# Altium footprint library Footprint_Vlad.PcbLib: 392 footprints (part 24 of 25)
Each footprint in its own frame and in the unit in brackets; x right, y up, seen from the top. Pads: shape width x height; smd on the part's side, far side on the other; paste and mask are expansions set on the pad; w line width, h text height; cw(c..) or ccw(c..) is an arc to the next point about the centre after c.
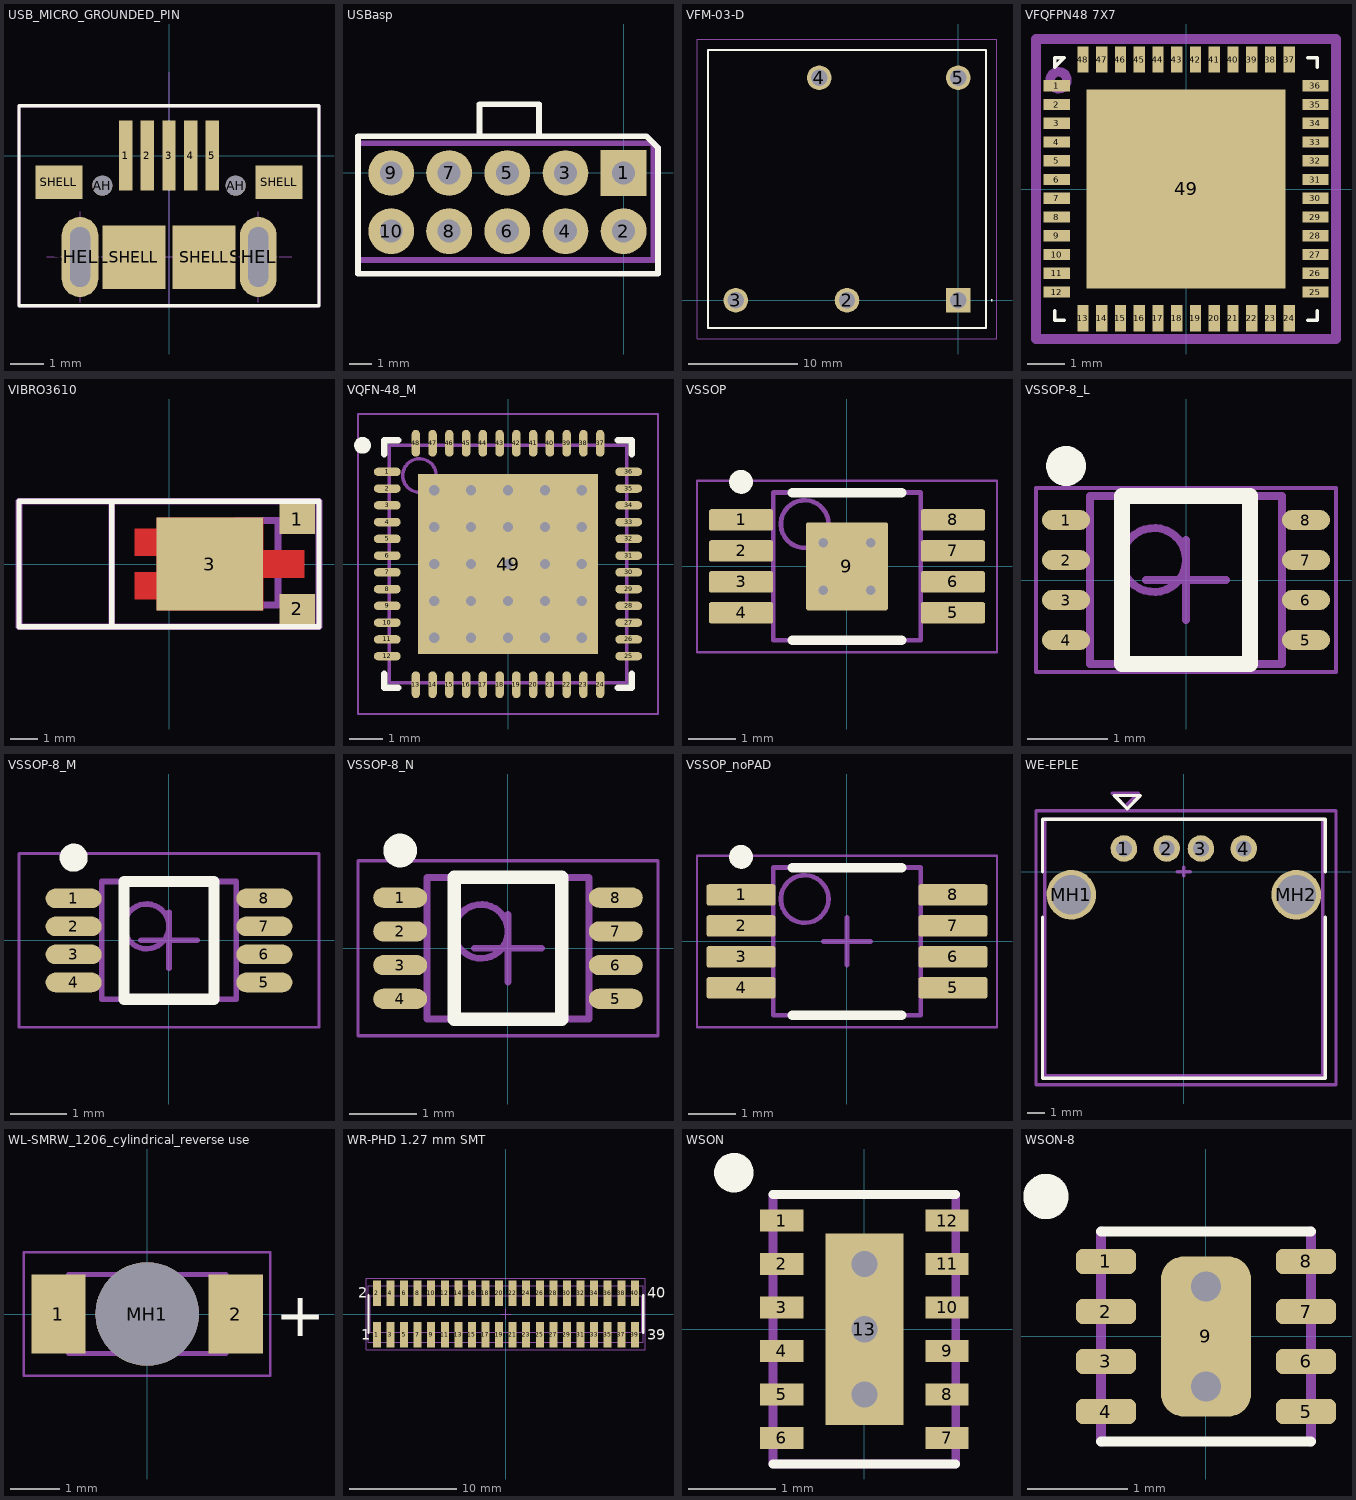
[diagram p23: the footprints below, top view; thin cyan lines are the x and y axes]

## USB_MICRO_GROUNDED_PIN [mm]
pads (13):
  rect 0.4x2.1 smd: 1(-1.3,0) 2(-0.65,0) 3(0,0) 4(0.65,0) 5(1.3,0)
  round 0.6 hole 0.6 unplated: AH(-2,-0.9) AH(2,-0.9)
  rect 1.4x1 smd: SHELL(-3.3,-0.8) SHELL(3.3,-0.8)
  oval 1.1x2.4 hole 0.6 slot 1.8 at 90 deg: SHELL(-2.67,-3.04) SHELL(2.68,-3.04)
  rect 1.9x1.9 smd: SHELL(-1.05,-3.05) SHELL(1.05,-3.05)
Top Overlay:
  lines w0.1: -4.5,-4.5 4.5,-4.5 4.5,1.5 -4.5,1.5 -4.5,-4.5
Mechanical 3:
  lines w0.01: -3.67,-3.04 3.68,-3.04 ; -2.67,-4.4 -2.67,-1.69 ; 0,-4.5 0,2.5 ; 2.68,-4.4 2.68,-1.69
Mechanical 15:
  lines w0.1: -4.5,-4.5 -4.5,1.5 4.5,1.5 4.5,-4.5 -4.5,-4.5
  text ".Designator" at -2.25,-1.25 h1.52
3D body "User Library-3057-51550001R-Rev_01.step": height 2.77, standoff -0.17, extent -4.75,-5.48 4.75,0.46

## USBasp [mm]
pads (10):
  rect 2x2 hole 1: 1(0,0)
  round 2 hole 1: 2(0,-2.54) 3(-2.54,0) 4(-2.54,-2.54) 5(-5.08,0) 6(-5.08,-2.54) 7(-7.62,0) 8(-7.62,-2.54) 9(-10.15,0) 10(-10.15,-2.54)
Top Overlay:
  lines w0.254: -6.3,1.6 -6.3,3 -3.7,3 -3.7,1.6 ; -11.6,-4.4 -11.6,1.6 1,1.6 1.5,1.1 1.5,-4.4 -11.6,-4.4
Mechanical 15:
  circle w0.254: c0,0 r0.1
  lines w0.254: -11.6,-3.8 1.3,-3.8 1.3,1.3 -11.6,1.3 -11.6,-3.8
  text ".Designator" at -11.2,1.6 h1.52
3D body "User Library-BH-10___64.step": height 8.84, standoff -3.3, extent -15.26,-6.025 5.1,3.175

## VFM-03-D [mm]
pads (5):
  rect 2.25x2.25 hole 1.5: 1(0,0)
  round 2.25 hole 1.5: 2(-10.16,0) 3(-20.32,0) 4(-12.7,20.32) 5(0,20.32)
Top Overlay:
  lines w0.1: 3,0 cw(c3.05,0) 3.1,0 cw(c3.05,0) 3,0
  lines w0.2: -22.86,-2.54 -22.86,22.86 2.54,22.86 2.54,-2.54 -22.86,-2.54
Mechanical 15:
  lines w0.1: -22.86,-2.54 -22.86,22.86 2.54,22.86 2.54,-2.54 -22.86,-2.54
Mechanical 20:
  lines w0.1: -23.86,-3.54 -23.86,23.86 3.54,23.86 3.54,-3.54 -23.86,-3.54
3D body "VFM-03-D.stp": height 12.3, standoff -5, extent -22.86,-2.54 2.54,22.86

## VFQFPN48 7X7 [mm]
pads (49):
  rect 0.7x0.3 smd: 1(-3.45,2.75) 2(-3.45,2.25) 3(-3.45,1.75) 4(-3.45,1.25) 5(-3.45,0.75) 6(-3.45,0.25) 7(-3.45,-0.25) 8(-3.45,-0.75) 9(-3.45,-1.25) 10(-3.45,-1.75) 11(-3.45,-2.25) 12(-3.45,-2.75) 25(3.45,-2.75) 26(3.45,-2.25) 27(3.45,-1.75) 28(3.45,-1.25) 29(3.45,-0.75) 30(3.45,-0.25) 31(3.45,0.25) 32(3.45,0.75) 33(3.45,1.25) 34(3.45,1.75) 35(3.45,2.25) 36(3.45,2.75)
  rect 0.3x0.7 smd: 13(-2.75,-3.45) 14(-2.25,-3.45) 15(-1.75,-3.45) 16(-1.25,-3.45) 17(-0.75,-3.45) 18(-0.25,-3.45) 19(0.25,-3.45) 20(0.75,-3.45) 21(1.25,-3.45) 22(1.75,-3.45) 23(2.25,-3.45) 24(2.75,-3.45) 37(2.75,3.45) 38(2.25,3.45) 39(1.75,3.45) 40(1.25,3.45) 41(0.75,3.45) 42(0.25,3.45) 43(-0.25,3.45) 44(-0.75,3.45) 45(-1.25,3.45) 46(-1.75,3.45) 47(-2.25,3.45) 48(-2.75,3.45)
  rect 5.3x5.3 smd: 49(0,0)
Top Overlay:
  lines w0.1: -3.5,-3.25 -3.5,-3.5 -3.25,-3.5 ; 3.25,-3.5 3.5,-3.5 3.5,-3.25 ; 3.25,3.5 3.5,3.5 3.5,3.25 ; -3.5,3.25 -3.5,3.5 -3.25,3.5 -3.5,3.25
Mechanical 15:
  circle w0.254: c-3.4,2.9 r0.224
  lines w0.254: -4,-4 4,-4 4,4 -4,4 -4,-4
  text ".Designator" at -3,4.2 h1.52

## VIBRO3610 [mm]
pads (3):
  rect 1.3x1.1 smd: 1(4.7,1.65) 2(4.7,-1.65)
  rect 3.9x3.4 smd paste-25.4 mask-25.4: 3(1.5,0)
Top Layer:
  region: -0.45,-1.7 3.45,-1.7 3.45,-0.5 4.95,-0.5 4.95,0.5 3.45,0.5 3.45,1.7 -0.45,1.7 -0.45,1.3 -1.25,1.3 -1.25,0.3 -0.45,0.3 -0.45,-0.3 -1.25,-0.3 -1.25,-1.3 -0.45,-1.3
Top Overlay:
  lines w0.2: -2.1,-2.3 -2.1,2.3 ; -5.5,-2.3 5.5,-2.3 5.5,2.3 -5.5,2.3 -5.5,-2.3
Top Paste:
  region: -0.45,-1.7 3.45,-1.7 3.45,-0.5 4.95,-0.5 4.95,0.5 3.45,0.5 3.45,1.7 -0.45,1.7 -0.45,1.3 -1.25,1.3 -1.25,0.3 -0.45,0.3 -0.45,-0.3 -1.25,-0.3 -1.25,-1.3 -0.45,-1.3
Top Solder:
  region: -0.45,-1.7 3.45,-1.7 3.45,-0.5 4.95,-0.5 4.95,0.5 3.45,0.5 3.45,1.7 -0.45,1.7 -0.45,1.3 -1.25,1.3 -1.25,0.3 -0.45,0.3 -0.45,-0.3 -1.25,-0.3 -1.25,-1.3 -0.45,-1.3
Mechanical 15:
  lines w0.254: -2.1,-2.2 -2.1,2.3 ; -0.254,0 0.254,0 ; 0,-0.254 0,0.254 ; 2.5,1.6 4,1.6 4,-1.5 2.7,-1.5 ; -5.5,-2.3 -5.5,2.3 5.5,2.3 5.5,-2.3 -5.5,-2.3
  text ".Designator" at -2,2.6 h1.52
3D body "User Library-z30c1t8219651.step": height 3.59, standoff 0, extent -5.05,-2.096 5.75,2.196

## VQFN-48_M [mm] "QFN, 48-Leads, Body 7.08x7.08mm, Pitch 0.5mm, Thermal Pad 5.36x5.36mm, IPC Low Density"
height 1
pads (49):
  oval 0.8x0.25 smd: 1(-3.6,2.75) 2(-3.6,2.25) 3(-3.6,1.75) 4(-3.6,1.25) 5(-3.6,0.75) 6(-3.6,0.25) 7(-3.6,-0.25) 8(-3.6,-0.75) 9(-3.6,-1.25) 10(-3.6,-1.75) 11(-3.6,-2.25) 12(-3.6,-2.75) 25(3.6,-2.75) 26(3.6,-2.25) 27(3.6,-1.75) 28(3.6,-1.25) 29(3.6,-0.75) 30(3.6,-0.25) 31(3.6,0.25) 32(3.6,0.75) 33(3.6,1.25) 34(3.6,1.75) 35(3.6,2.25) 36(3.6,2.75)
  oval 0.25x0.8 smd: 13(-2.75,-3.6) 14(-2.25,-3.6) 15(-1.75,-3.6) 16(-1.25,-3.6) 17(-0.75,-3.6) 18(-0.25,-3.6) 19(0.25,-3.6) 20(0.75,-3.6) 21(1.25,-3.6) 22(1.75,-3.6) 23(2.25,-3.6) 24(2.75,-3.6) 37(2.75,3.6) 38(2.25,3.6) 39(1.75,3.6) 40(1.25,3.6) 41(0.75,3.6) 42(0.25,3.6) 43(-0.25,3.6) 44(-0.75,3.6) 45(-1.25,3.6) 46(-1.75,3.6) 47(-2.25,3.6) 48(-2.75,3.6)
  rect 5.36x5.36 smd: 49(0,0)
via 2.2,-2.2 diameter 0.6 hole 0.3
via 1.1,-2.2 diameter 0.6 hole 0.3
via 0,-2.2 diameter 0.6 hole 0.3
via -1.1,-2.2 diameter 0.6 hole 0.3
via -2.2,-2.2 diameter 0.6 hole 0.3
via 2.2,-1.1 diameter 0.6 hole 0.3
via 1.1,-1.1 diameter 0.6 hole 0.3
via 0,-1.1 diameter 0.6 hole 0.3
via -1.1,-1.1 diameter 0.6 hole 0.3
via -2.2,-1.1 diameter 0.6 hole 0.3
via 2.2,0 diameter 0.6 hole 0.3
via 1.1,0 diameter 0.6 hole 0.3
via 0,0 diameter 0.6 hole 0.3
via -1.1,0 diameter 0.6 hole 0.3
via -2.2,0 diameter 0.6 hole 0.3
via 2.2,1.1 diameter 0.6 hole 0.3
via 1.1,1.1 diameter 0.6 hole 0.3
via 0,1.1 diameter 0.6 hole 0.3
via -1.1,1.1 diameter 0.6 hole 0.3
via -2.2,1.1 diameter 0.6 hole 0.3
via 2.2,2.2 diameter 0.6 hole 0.3
via 1.1,2.2 diameter 0.6 hole 0.3
via 0,2.2 diameter 0.6 hole 0.3
via -1.1,2.2 diameter 0.6 hole 0.3
via -2.2,2.2 diameter 0.6 hole 0.3
Top Overlay:
  circle w0.25: c-4.34,3.54 r0.125
  lines w0.2: -3.69,-3.275 -3.69,-3.69 -3.275,-3.69 ; -3.69,3.275 -3.69,3.69 -3.275,3.69 ; 3.275,-3.69 3.69,-3.69 3.69,-3.275 ; 3.275,3.69 3.69,3.69 3.69,3.275
Mechanical 13:
  circle w0.1: c-2.64,2.64 r0.5
  lines w0.1: -3.54,-3.54 3.54,-3.54 3.54,3.54 -3.54,3.54 -3.54,-3.54
Mechanical 15:
  lines w0.05: -4.475,-4.475 4.475,-4.475 4.475,4.475 -4.475,4.475 -4.475,-4.475
  lines w0.1: -0.5,0 0.5,0 ; 0,-0.5 0,0.5
3D body: height 1, standoff 0, extent -3.54,-3.54 3.54,3.54

## VSSOP [mm] "TSOP, 8-Leads, Body 3.1x3.1mm, Pitch 0.65mm, Thermal Pad 1.85x1.73mm, IPC Medium Density"
height 1.1
pads (9):
  rrect22% 1.35x0.45 smd: 1(-2.225,0.975) 2(-2.225,0.325) 3(-2.225,-0.325) 4(-2.225,-0.975) 5(2.225,-0.975) 6(2.225,-0.325) 7(2.225,0.325) 8(2.225,0.975)
  rrect6% 1.73x1.85 smd: 9(0,0)
via 0.5,-0.5 diameter 0.4 hole 0.2
via -0.5,-0.5 diameter 0.4 hole 0.2
via 0.5,0.5 diameter 0.4 hole 0.2
via -0.5,0.5 diameter 0.4 hole 0.2
Top Overlay:
  circle w0.25: c-2.225,1.775 r0.125
  lines w0.2: -1.15,-1.55 1.15,-1.55 ; -1.15,1.55 1.15,1.55
Mechanical 1:
  text ".Designator" at -1.397,-0.254 h0.7
Mechanical 13:
  circle w0.1: c-0.889,0.889 r0.5
  lines w0.1: -1.55,-1.55 1.55,-1.55 1.55,1.55 -1.55,1.55 -1.55,-1.55
Mechanical 15:
  lines w0.05: -3.15,-1.8 3.15,-1.8 3.15,1.8 -3.15,1.8 -3.15,-1.8
  lines w0.1: -0.5,0 0.5,0 ; 0,-0.5 0,0.5
3D body "MUY08A_ASM.stp": height 0.94, standoff -0.02, extent -2.451,-1.499 2.451,1.499

## VSSOP-8_L [mm] "VSSOP, 8-Leads, Body 2,00x2,30mm, Pitch 0,50mm, IPC High Density"
height 0.9
pads (8):
  oval 0.6x0.25 smd: 1(-1.5,0.75) 2(-1.5,0.25) 3(-1.5,-0.25) 4(-1.5,-0.75) 5(1.5,-0.75) 6(1.5,-0.25) 7(1.5,0.25) 8(1.5,0.75)
Top Overlay:
  circle w0.25: c-1.5,1.425 r0.125
  lines w0.2: -0.8,-1.05 0.8,-1.05 0.8,1.05 -0.8,1.05 -0.8,-1.05
Assembly Top:
  circle w0.1: c-0.4,0.25 r0.4
  lines w0.1: -1.2,-1.05 1.2,-1.05 1.2,1.05 -1.2,1.05 -1.2,-1.05
Courtyard Top:
  lines w0.05: -1.875,-1.15 1.875,-1.15 1.875,1.15 -1.875,1.15 -1.875,-1.15
  lines w0.1: -0.5,0 0.5,0 ; 0,-0.5 0,0.5
3D body "VSSOP-8_L.step": height 0.9, standoff 0, extent -1.549,-1.05 1.549,1.05

## VSSOP-8_M [mm] "VSSOP, 8-Leads, Body 2,00x2,30mm, Pitch 0,50mm, IPC Low Density"
height 0.9
pads (8):
  oval 1x0.35 smd: 1(-1.7,0.75) 2(-1.7,0.25) 3(-1.7,-0.25) 4(-1.7,-0.75) 5(1.7,-0.75) 6(1.7,-0.25) 7(1.7,0.25) 8(1.7,0.75)
Top Overlay:
  circle w0.25: c-1.7,1.475 r0.125
  lines w0.2: -0.8,-1.05 -0.8,1.05 0.8,1.05 0.8,-1.05 -0.8,-1.05
Assembly Top:
  circle w0.1: c-0.4,0.25 r0.4
  lines w0.1: -1.2,-1.05 -1.2,1.05 1.2,1.05 1.2,-1.05 -1.2,-1.05
Courtyard Top:
  lines w0.05: -2.675,-1.55 -2.675,1.55 2.675,1.55 2.675,-1.55 -2.675,-1.55
  lines w0.1: -0.5,0 0.5,0 ; 0,-0.5 0,0.5
3D body "VSSOP-8_M.step": height 0.9, standoff 0, extent -1.549,-1.05 1.549,1.05

## VSSOP-8_N [mm] "VSSOP, 8-Leads, Body 2,00x2,30mm, Pitch 0,50mm, IPC Medium Density"
height 0.9
pads (8):
  oval 0.8x0.3 smd: 1(-1.6,0.75) 2(-1.6,0.25) 3(-1.6,-0.25) 4(-1.6,-0.75) 5(1.6,-0.75) 6(1.6,-0.25) 7(1.6,0.25) 8(1.6,0.75)
Top Overlay:
  circle w0.25: c-1.6,1.45 r0.125
  lines w0.2: -0.8,-1.05 -0.8,1.05 0.8,1.05 0.8,-1.05 -0.8,-1.05
Assembly Top:
  circle w0.1: c-0.4,0.25 r0.4
  lines w0.1: -1.2,-1.05 -1.2,1.05 1.2,1.05 1.2,-1.05 -1.2,-1.05
Courtyard Top:
  lines w0.05: -2.225,-1.3 -2.225,1.3 2.225,1.3 2.225,-1.3 -2.225,-1.3
  lines w0.1: -0.5,0 0.5,0 ; 0,-0.5 0,0.5
3D body "VSSOP-8_N.step": height 0.9, standoff 0, extent -1.549,-1.05 1.549,1.05

## VSSOP_noPAD [mm] "TSOP, 8-Leads, Body 3.1x3.1mm, Pitch 0.65mm, Thermal Pad 1.85x1.73mm, IPC Medium Density"
height 1.1
pads (8):
  rrect22% 1.45x0.45 smd: 1(-2.225,0.975) 2(-2.225,0.325) 3(-2.225,-0.325) 4(-2.225,-0.975) 5(2.225,-0.975) 6(2.225,-0.325) 7(2.225,0.325) 8(2.225,0.975)
Top Overlay:
  circle w0.25: c-2.225,1.775 r0.125
  lines w0.2: -1.15,-1.55 1.15,-1.55 ; -1.15,1.55 1.15,1.55
Mechanical 1:
  text ".Designator" at -1.397,-0.254 h0.7
Mechanical 13:
  circle w0.1: c-0.889,0.889 r0.5
  lines w0.1: -1.55,-1.55 -1.55,1.55 1.55,1.55 1.55,-1.55 -1.55,-1.55
Mechanical 15:
  lines w0.05: -3.15,-1.8 -3.15,1.8 3.15,1.8 3.15,-1.8 -3.15,-1.8
  lines w0.1: -0.5,0 0.5,0 ; 0,-0.5 0,0.5
3D body "MUY08A_ASM.stp": height 0.94, standoff -0.02, extent -2.451,-1.499 2.451,1.499

## WE-EPLE [mm] "THT, USB 2.0 A Connector, 4Pin, Body 15.8 x14.5mm"
height 7.12
pads (6):
  round 1.55 hole 0.92: 1(-3.5,1.35) 2(-1,1.35) 3(1,1.35) 4(3.5,1.35)
  round 2.9 hole 2.3: MH1(-6.57,-1.35) MH2(6.57,-1.35)
Top Overlay:
  lines w0.2: -8.255,-2.667 -8.255,-12.065 8.255,-12.065 8.255,-2.667 ; -8.255,0 -8.255,3.048 8.255,3.048 8.255,0 ; -4.064,4.445 -3.302,3.683 -2.54,4.445 -4.064,4.445
Mechanical 13:
  lines w0.2: -8.128,-11.938 -8.128,3.048 8.128,3.048 8.128,-11.938 -8.128,-11.938
Mechanical 15:
  lines w0.2: -0.381,0 0.381,0 ; 0,-0.254 0,0.254 ; -8.636,-12.446 -8.636,3.556 8.89,3.556 8.89,-12.446 -8.636,-12.446 ; -4.191,4.572 -2.667,4.572 -3.429,3.81 -4.191,4.572
  text ".Designator" at 0,0 h0.76
3D body "WE-EPLE_8492121_1.stp": height 7.8, standoff -3.49, extent -7.892,-11.698 7.873,2.802

## WL-SMRW_1206_cylindrical_reverse use [mm] "SMD Mono-color Reverse mount LED, body 3.2x1.2mm"
height 0.4
pads (3):
  rect 1.1x1.6 smd: 1(-1.8,0) 2(1.8,0)
  round 2.1 hole 2.1 unplated: MH1(0,0)
Top Overlay:
  text "+" at 2.6,-0.45 h0.89
Mechanical 13:
  region: 0.8,0.55 0.8,-0.5 -0.15,-0.5 -0.15,-0.2 -0.75,-0.2 -0.75,0.2 -0.15,0.2 -0.15,0.55
  lines w0.1: -1.6,-0.8 1.6,-0.8 1.6,0.8 -1.6,0.8 -1.6,-0.8
Mechanical 15:
  lines w0.05: -0.5,0 0.5,0 ; 0,-0.5 0,0.5 ; -2.5,-1.25 -2.5,1.25 2.5,1.25 2.5,-1.25 -2.5,-1.25
3D body "WL-SMRW_1206_cylindrical.stp": height 0.4, standoff -0.8, extent -1.6,-0.8 1.6,0.8

## WR-PHD 1.27 mm SMT [mm] "Pin Header, pitch 1.27 mm, SMD, Vertical, dual row, 40p"
height 6.55
pads (40):
  rect 0.75x2.4 smd: 1(-12.065,-1.95) 2(-12.065,1.95) 3(-10.795,-1.95) 4(-10.795,1.95) 5(-9.525,-1.95) 6(-9.525,1.95) 7(-8.255,-1.95) 8(-8.255,1.95) 9(-6.985,-1.95) 10(-6.985,1.95) 11(-5.715,-1.95) 12(-5.715,1.95) 13(-4.445,-1.95) 14(-4.445,1.95) 15(-3.175,-1.95) 16(-3.175,1.95) 17(-1.905,-1.95) 18(-1.905,1.95) 19(-0.635,-1.95) 20(-0.635,1.95) 21(0.635,-1.95) 22(0.635,1.95) 23(1.905,-1.95) 24(1.905,1.95) 25(3.175,-1.95) 26(3.175,1.95) 27(4.445,-1.95) 28(4.445,1.95) 29(5.715,-1.95) 30(5.715,1.95) 31(6.985,-1.95) 32(6.985,1.95) 33(8.255,-1.95) 34(8.255,1.95) 35(9.525,-1.95) 36(9.525,1.95) 37(10.795,-1.95) 38(10.795,1.95) 39(12.065,-1.95) 40(12.065,1.95)
Top Overlay:
  lines w0.2: -12.85,-1.775 -12.85,1.775 ; 12.85,-1.775 12.85,1.775
  text "1" at -13.53,-2.4 h1
  text "2" at -13.83,1.5 h1
  text "39" at 13.23,-2.4 h1
  text "40" at 13.23,1.5 h1
Mechanical 11:
  lines w0.1: -12.7,-1.7 -12.7,1.7 12.7,1.7 12.7,-1.7 -12.7,-1.7
Mechanical 13:
  lines w0.1: -12.85,-2.625 12.85,-2.625 12.85,2.625 -12.85,2.625 -12.85,-2.625
Mechanical 15:
  lines w0.1: -0.5,0 0.5,0 ; 0,-0.5 0,0.5 ; -13.05,-3.35 -13.05,3.35 13.05,3.35 13.05,-3.35 -13.05,-3.35
3D body "62104021021.stp": height 5.9, standoff -0.01, extent -12.7,-2.5 12.7,2.5

## WSON [mm]
pads (13):
  rect 0.5x0.25 smd: 1(-0.95,1.25) 2(-0.95,0.75) 3(-0.95,0.25) 4(-0.95,-0.25) 5(-0.95,-0.75) 6(-0.95,-1.25) 7(0.95,-1.25) 8(0.95,-0.75) 9(0.95,-0.25) 10(0.95,0.25) 11(0.95,0.75) 12(0.95,1.25)
  rect 0.9x2.2 smd: 13(0,0)
via 0,0 diameter 0.6 hole 0.3
via 0,0.75 diameter 0.6 hole 0.3
via 0,-0.75 diameter 0.6 hole 0.3
Top Overlay:
  circle w0.254: c-1.5,1.8 r0.1
  lines w0.1: -1.05,-1.55 1.05,-1.55 ; -1.05,1.55 1.05,1.55
Mechanical 15:
  lines w0.1: -1.05,-1.55 -1.05,1.55 1.05,1.55 1.05,-1.55 -1.05,-1.55
3D body: height 0.8, standoff 0, extent -1.05,-1.55 1.05,1.55

## WSON-8 [mm]
pads (9):
  rrect50% 0.6x0.25 smd: 1(-1,0.75) 2(-1,0.25) 3(-1,-0.25) 4(-1,-0.75) 5(1,-0.75) 6(1,-0.25) 7(1,0.25) 8(1,0.75)
  rrect50% 0.9x1.6 smd: 9(0,0)
via 0,-0.5 diameter 0.6 hole 0.3
via 0,0.5 diameter 0.6 hole 0.3
Top Overlay:
  circle w0.254: c-1.6,1.4 r0.1
  lines w0.1: -1.05,-1.05 1.05,-1.05 ; -1.05,1.05 1.05,1.05
Mechanical 15:
  lines w0.1: -1.05,-1.05 -1.05,1.05 ; 1.05,-1.05 1.05,1.05
3D body: height 0.8, standoff 0, extent -1.05,-1.05 1.05,1.05